# Altium footprint library Diode$.PcbLib: 98 footprints (part 2 of 7)
Each footprint in its own frame and in the unit in brackets; x right, y up, seen from the top. Pads: shape width x height; smd on the part's side, far side on the other; paste and mask are expansions set on the pad; w line width, h text height; cw(c..) or ccw(c..) is an arc to the next point about the centre after c.
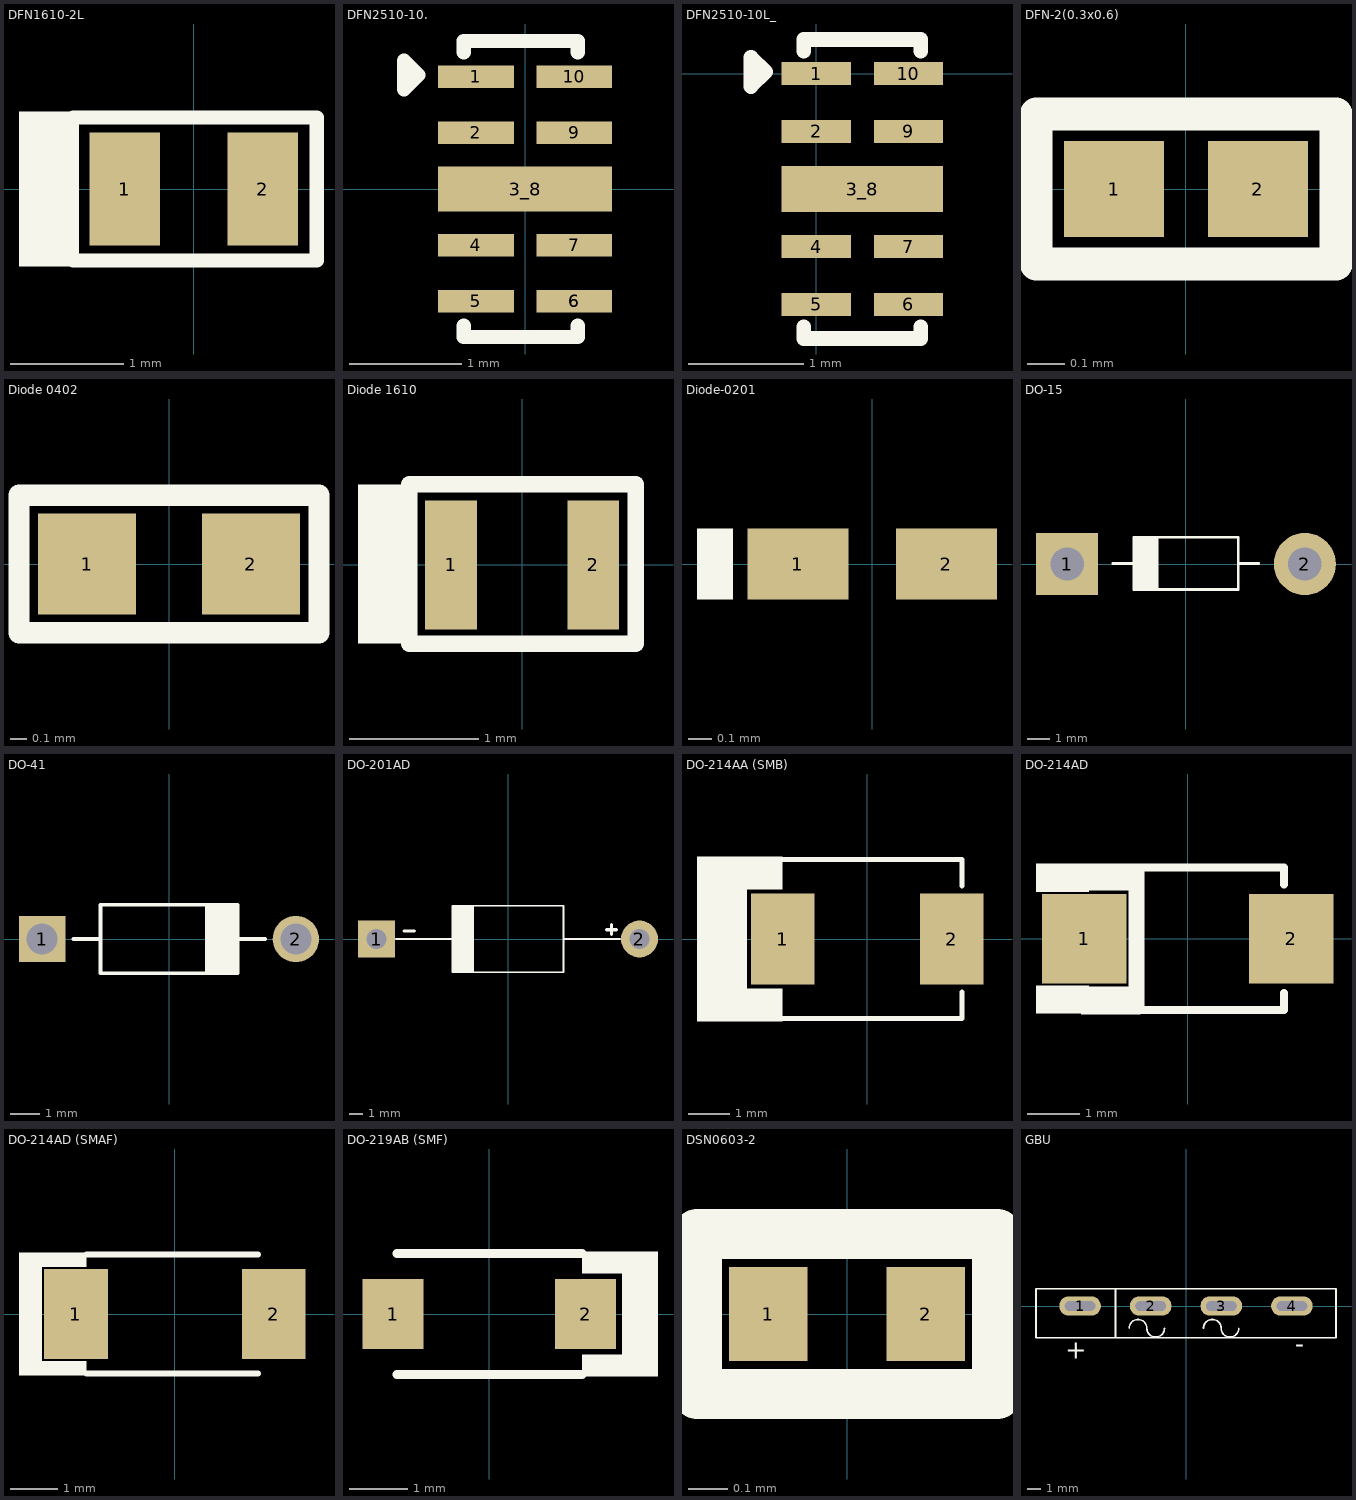
[diagram p1: the footprints below, top view; thin cyan lines are the x and y axes]

## DFN1610-2L [mm]
pads (2):
  rect 0.625x1 smd: 1(-0.612,0) 2(0.613,0)
Top Overlay:
  rectangle: -1.549,-0.686 -1.016,0.686
  lines w0.127: -1.067,-0.635 1.092,-0.635 1.092,0.635 -1.067,0.635
3D body "Download_STP_WE-TVS-DFN1610-2L (rev1).stp": height 0.51, standoff 0, extent -0.8,-0.5 0.8,0.5

## DFN2510-10. [mm]
pads (10):
  rect 0.675x0.2 smd: 1(-0.437,1) 2(-0.437,0.5) 4(-0.437,-0.5) 5(-0.437,-1) 6(0.437,-1) 6(0.437,-1) 7(0.437,-0.5) 9(0.437,0.5) 10(0.437,1)
  rect 1.55x0.4 smd: 3_8(0,0)
Top Overlay:
  lines w0.127: -0.546,-1.219 -0.546,-1.321 0.47,-1.321 0.47,-1.219 ; -0.546,1.219 -0.546,1.321 0.47,1.321 0.47,1.219 ; -1.079,0.889 -0.952,1.016 -1.079,1.143 -1.079,0.889
3D body "TPD4E05U06DQAR--3DModel-STEP-56544.STEP": height 0.55, standoff 0, extent -0.5,-1.25 0.5,1.25

## DFN2510-10L_ [mm]
pads (9):
  rect 0.6x0.2 smd: 1(0,0) 2(0,-0.5) 4(0,-1.5) 5(0,-2) 6(0.8,-2) 7(0.8,-1.5) 9(0.8,-0.5) 10(0.8,0)
  rect 1.4x0.4 smd: 3_8(0.4,-1)
Top Overlay:
  lines w0.127: -0.108,-2.194 -0.108,-2.295 0.908,-2.295 0.908,-2.194 ; -0.108,0.194 -0.108,0.295 0.908,0.295 0.908,0.194 ; -0.565,-0.111 -0.438,0.016 -0.565,0.143 -0.565,-0.111
3D body "TPD4E05U06DQAR--3DModel-STEP-56544.STEP": height 0.55, standoff 0, extent -0.1,-2.25 0.9,0.25

## DFN-2(0.3x0.6) [mm]
pads (2):
  rect 0.27x0.26 smd mask+0.05: 1(-0.195,0) 2(0.195,0)
Top Overlay:
  lines w0.089: -0.406,-0.203 0.406,-0.203 0.406,0.203 -0.406,0.203 -0.406,-0.203
3D body "ESDM2032MX4T5G.STEP": height 0.3, standoff 0, extent -0.3,-0.15 0.3,0.15

## Diode 0402 [mm]
pads (2):
  rect 0.58x0.6 smd: 1(-0.485,0) 2(0.485,0)
Top Overlay:
  lines w0.127: -0.889,-0.406 -0.889,0.406 0.889,0.406 0.889,-0.406 -0.889,-0.406
3D body "82307050029.stp": height 0.5, standoff 0, extent -0.5,-0.25 0.5,0.25

## Diode 1610 [mm]
pads (2):
  rect 0.4x1 smd paste+0 mask+0.051: 1(-0.55,0) 2(0.55,0)
Top Overlay:
  rectangle: -1.27,-0.61 -0.874,0.624
  lines w0.127: -0.874,-0.61 -0.874,0.624 0.878,0.624 0.878,-0.61 -0.874,-0.61
3D body "C1975146.step": height 0.57, standoff 0, extent -0.801,-0.5 0.8,0.5

## Diode-0201 [mm]
height 0.33
pads (2):
  rect 0.425x0.3 smd paste-1 mask+0.05: 1(-0.312,0) 2(0.312,0)
Top Overlay:
  rectangle: -0.737,-0.15 -0.584,0.15
Top Paste:
  region: -0.165,-0.112 -0.485,-0.112 -0.485,0.112 -0.165,0.112
  region: 0.485,-0.112 0.165,-0.112 0.165,0.112 0.485,0.112
3D body "step_temp.STEP": height 0.33, standoff 0, extent -0.3,-0.15 0.3,0.15

## DO-15 [mm]
pads (2):
  rect 2.8x2.8 hole 1.5: 1(-5.35,0)
  round 2.8 hole 1.5: 2(5.35,0)
Top Overlay:
  region: -1.228,1.2 -2.35,1.2 -2.35,-1.15 -1.228,-1.15
  lines w0.127: -3.3,0.025 -2.35,0.025 ; 3.275,0.025 2.35,0.025 ; -2.35,0.025 -2.35,1.2 2.35,1.2 2.35,0.025 ; -2.35,0.025 -2.35,-1.15 2.35,-1.15 2.35,0.025
3D body "P6KE7.5A.STEP": height 3.1, standoff -5, extent -5.75,-1.546 5.75,1.553

## DO-41 [mm]
pads (2):
  rect 1.59x1.59 hole 1.06: 1(-4.35,0)
  round 1.59 hole 1.06: 2(4.35,0)
Top Overlay:
  rectangle: 1.228,-1.175 2.35,1.175
  lines w0.127: -3.275,0 -2.35,0 ; 3.3,0 2.35,0 ; -2.35,0 -2.35,1.175 2.35,1.175 2.35,0 ; -2.35,0 -2.35,-1.175 2.35,-1.175 2.35,0
3D body "1N4007.STEP": height 2.4, standoff -3.5, extent -4.75,-1.201 4.75,1.192

## DO-201AD [mm]
pads (2):
  rect 2.8x2.8 hole 1.5: 1(-9.95,0)
  round 2.8 hole 1.5: 2(9.95,0)
Top Overlay:
  rectangle: -4.2,-2.525 -2.566,2.525
  lines w0.127: -8.505,0 -4.2,0 ; 8.505,0 4.2,0 ; -4.2,0 -4.2,-2.525 4.2,-2.525 4.2,0 ; -4.2,0 -4.2,2.525 4.2,2.525 4.2,0
  lines w0.254: -7.842,0.61 -7.105,0.61 ; 7.474,0.711 8.211,0.711 ; 7.83,0.356 7.83,1.092
3D body "1N5821--3DModel-STEP-56544.STEP": height 5.29, standoff -17, extent -10.575,-2.65 10.575,2.65

## DO-214AA (SMB) [mm]
pads (2):
  rect 1.52x2.18 smd: 1(-2.035,0) 2(2.035,0)
Top Overlay:
  rectangle: -3.081,-1.981 -2.035,-1.192
  rectangle: -3.081,1.192 -2.035,1.981
  rectangle: -4.099,-1.981 -2.896,1.981
  lines w0.127: -2.439,-1.917 2.28,-1.917 2.28,-1.276 ; -2.439,1.917 2.28,1.917 2.28,1.276
3D body "User Library-DIOM5539X24.STEP": height 2.45, standoff 0.03, extent -2.75,-1.95 2.75,1.95

## DO-214AD [mm]
pads (2):
  rect 1.6x1.7 smd paste+0 mask+0.051: 1(-1.96,0) 2(1.96,0)
Top Overlay:
  rectangle: -2.01,0.911 -0.892,1.42
  rectangle: -2.01,-1.43 -0.892,-0.908
  rectangle: -1.122,-0.914 -0.892,0.94
  rectangle: -2.87,0.889 -1.87,1.42
  rectangle: -2.87,-1.42 -1.87,-0.889
  region: -2.01,-1.43 -1.73,-1.43 -1.73,-1.03 -2.01,-1.03
  region: -1.74,1.42 -2.01,1.42 -2.01,1.02 -1.73,1.02
  lines w0.152: -1.826,-1.351 1.826,-1.351 1.826,-1.03 ; -1.826,1.351 1.826,1.351 1.826,1.03 ; -0.892,-1.351 -0.892,1.351
3D body "C328590.step": height 1.06, standoff 0, extent -2.325,-1.3 2.325,1.3

## DO-214AD (SMAF) [mm]
pads (2):
  rect 1.34x1.9 smd paste+0 mask+0.051: 1(-2.08,0) 2(2.08,0)
Top Overlay:
  rectangle: -3.15,-1.295 -1.854,-0.991
  rectangle: -3.277,-1.295 -2.794,1.295
  rectangle: -3.15,0.991 -1.854,1.295
  lines w0.127: -1.854,-1.25 1.747,-1.25 ; -1.854,1.25 1.747,1.25
3D body "User Library-DO-214AD.step": height 1, standoff 0, extent -2.35,-1.25 2.35,1.25

## DO-219AB (SMF) [mil]
pads (2):
  rect 41x47 smd: 1(-64.5,0) 2(64.5,0)
Top Overlay:
  rectangle: 89,-30 113,30
  rectangle: 62,-42 113,-27
  rectangle: 62,27 113,42
  lines w6: -62,-40.5 62,-40.5 ; -62,40.5 62,40.5
3D body "DIO_BZD27C4V3P_VIS.step": height 43.27, standoff 0, extent -77.01,-37.48 77.01,37.48

## DSN0603-2 [mm]
pads (2):
  rect 0.2x0.24 smd mask+0.055: 1(-0.2,0) 2(0.2,0)
Top Overlay:
  lines w0.127: -0.381,-0.203 0.381,-0.203 0.381,0.203 -0.381,0.203 -0.381,-0.203
3D body "PESD5V0H1BSF.STEP": height 0.32, standoff 0, extent -0.3,-0.15 0.3,0.15

## GBU [mm]
pads (4):
  oval 3x1.4 hole 0.7 slot 2.2 at 0 deg paste-2539.97 mask+0.051: 1(-7.62,0) 2(-2.54,0) 3(2.54,0) 4(7.62,0)
Top Overlay:
  lines w0.127: -5.08,-2.28 -5.08,1.25 ; -4.09,-1.6 cw(c-3.455,-1.6) -2.82,-1.6 ccw(c-2.185,-1.6) -1.55,-1.6 ; 1.26,-1.6 cw(c1.895,-1.6) 2.53,-1.6 ccw(c3.165,-1.6) 3.8,-1.6 ; -10.795,-2.28 10.795,-2.28 10.795,1.25 -10.795,1.25 -10.795,-2.28
  text "+" at -7.137,-2.649 h1.33
  text "-" at 8.509,-2.359 h1.33
3D body "C150753.step": height 19.9, standoff -3.5, extent -10.75,-2.255 10.75,1.196